# Altium schematic symbol library BAT43WS-TP.SchLib: 1 symbol
Pins are listed as number, name and electrical type; pins without a type are passive.

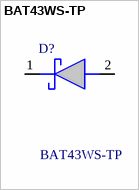
[diagram p0: symbol BAT43WS-TP]

## BAT43WS-TP
designator D?
Small Signal Schottky Diodes; Manufacturer_Name: MCC; Geometry.Height: 1.15mm; Mouser Part Number: 833-BAT43WS-TP; Mouser Price/Stock: https://www.mouser.co.uk/ProductDetail/Micro-Commercial-Components-MCC/BAT43WS-TP?qs=Vo7e0yZOYdELUvvmcALzzg%3D%3D; Manufacturer_Part_Number: BAT43WS-TP; Datasheet Link: https://www.mccsemi.com/pdf/Products/BAT42WS-BAT43WS(SOD-323).pdf
footprint SOD2512X115N
pins: 1 K, 2 A